# Altium schematic symbol library Crystal_Osilator.SchLib: 109 symbols (part 1 of 2)
Pins are listed as number, name and electrical type; pins without a type are passive.

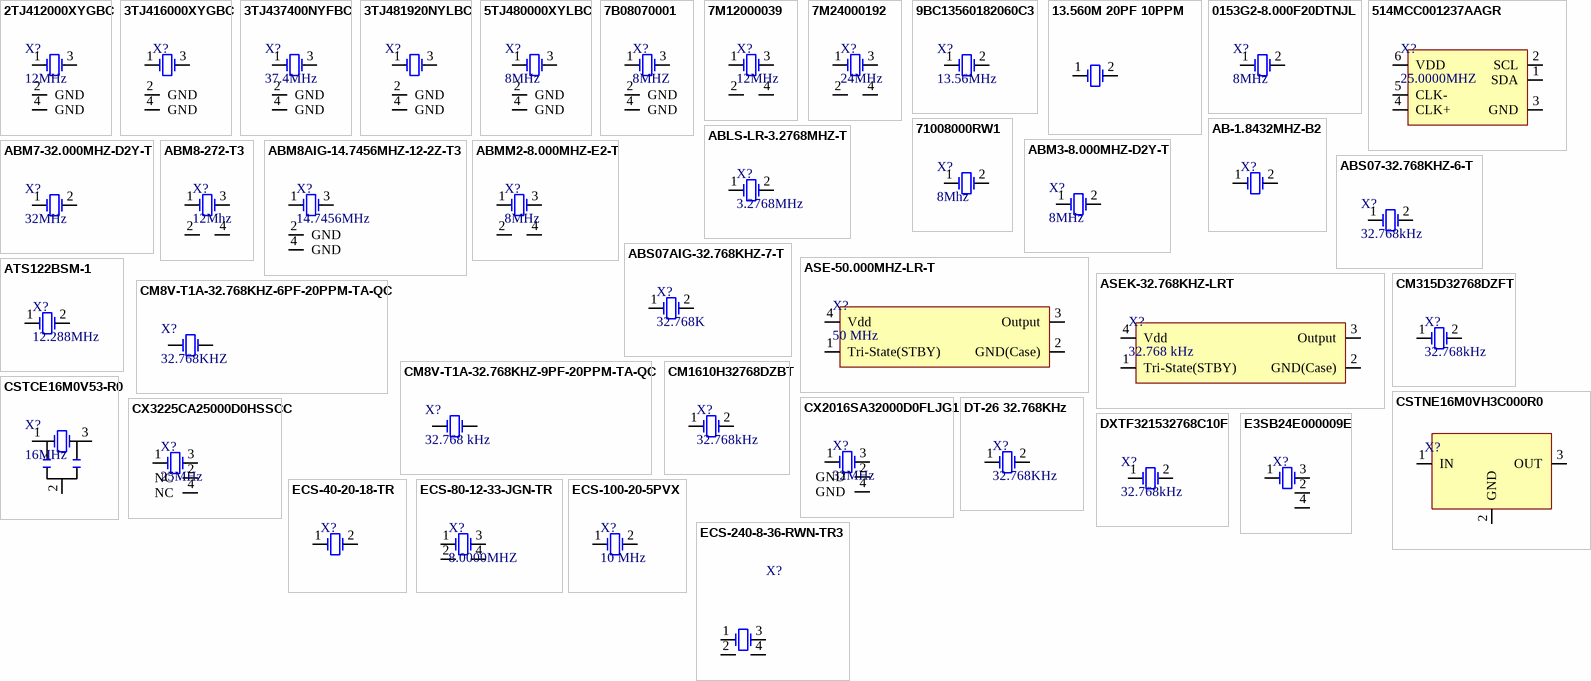
[diagram p0: symbols 2TJ412000XYGBC to ECS-240-8-36-RWN-TR3]

## 2TJ412000XYGBC
designator X?, comment 12MHz
12MHz 18pF ±10ppm SMD2520-4P Crystals ROHS; Manufacturer: JYJE; Manufacturer Part Number: 2TJ412000XYGBC; Package: SMD2520-4P; LCSC Part Number: C2149207; Item Type: Crystal; ComponentLink1Description: LCSC; ComponentLink1URL: https://www.lcsc.com/product-detail/Crystals_JYJE-2TJ412000XYGBC_C2149207.html
footprint SMD2520-4P
pins: 1 OSC1, 2 GND, 3 OSC2, 4 GND

## 3TJ416000XYGBC
designator X?
16MHz 贴片晶振 18pF ±10ppm ±30ppm SMD3225-4P Crystals ROHS; Manufacturer: JYJE; Manufacturer Part Number: 3TJ416000XYGBC; Supplier: LCSC; LCSC Part Number: C2149027; RoHS: No; Item Type: Crystal
footprint SMD3225-4P
pins: 1 OSC1, 2 GND, 3 OSC2, 4 GND

## 3TJ437400NYFBC
designator X?, comment 37.4MHz
37.4MHz SMD Crystal Resonator 12pF 60Ω SMD3225-4P Crystals ROHS; Manufacturer: JYJE; Manufacturer Part Number: 3TJ437400NYFBC; Value: 37.4MHz; Footprint: Custom; ComponentLink1Description: LCSC; ComponentLink1URL: https://lcsc.com/product-detail/Crystals_JYJE-3TJ437400NYFBC_C2149138.html; LCSC Part Number: C2149138; Item Type: Crystal
footprint 3TJ437400NYFBC_
pins: 1 OSC1, 2 GND, 3 OSC2, 4 GND

## 3TJ481920NYLBC
designator X?
8.192MHz SMD Crystal Resonator 12pF 150Ω SMD_3225_4P Crystals ROHS; Manufacturer: JYJE; Manufacturer Part Number: 3TJ481920NYLBC; Footprint: Custom; ComponentLink1Description: LCSC; ComponentLink1URL: https://lcsc.com/product-detail/Crystals_JYJE-3TJ481920NYLBC_C2898996.html; Value: 8.192MHz; LCSC Part Number: C2898996; Item Type: Crystal
footprint 3TJ481920NYLBC_
pins: 1 OSC1, 2 GND, 3 OSC2, 4 GND

## 5TJ480000XYLBC
designator X?, comment 8MHz
8MHz 18pF ±10ppm SMD5032-4P Crystals ROHS; Manufacturer: JYJE; Manufacturer Part Number: 5TJ480000XYLBC; ComponentLink1Description: LCSC; ComponentLink1URL: https://www.lcsc.com/product-detail/Crystals_JYJE-5TJ480000XYLBC_C2149247.html; Package: SMD5032-4P; LCSC Part Number: C2149247; Item Type: Crystal
footprint 5TJ480000XYLBC_
pins: 1 OSC1, 2 GND, 3 OSC2, 4 GND

## 7B08070001
designator X?, comment 8MHZ
CRYSTAL 8.0000MHZ 18PF SMD; Manufacturer: TXC; Manufacturer Part Number: 7B08070001; Frequency Stability: 20ppm; Supplier 1: Digi-Key; Stock 1: 0; Pricing 1: 1000=0.39 (USD); Mount: Surface Mount; Case/Package: SMD/SMT; Min Operating Temperature: -20°C; Max Operating Temperature: 75°C; Frequency: 8MHz; Load Capacitance: 18pF; Frequency Tolerance: 20ppm; Length: 0.197inch; Height: 0.041inch; Width: 0.126inch; ComponentLink1URL: http://www.txccorp.com/download/products/quartz_crystals/2015TXC_7B_19.pdf?src-supplier=Digi-Key; ComponentLink1Description: http://www.txccorp.com/download/products/quartz_crystals/2015TXC_7B_19.pdf?src-supplier=Digi-Key; ComponentLink2URL: http://www.mouser.com/ds/2/417/7b-5226.pdf?src-supplier=Mouser; ComponentLink2Description: http://www.mouser.com/ds/2/417/7b-5226.pdf?src-supplier=Mouser; Supplier Part Number 1: 7B08070001-ND; LCSC Part Number: C331620; Item Type: Crystal
footprint 7B08070001_
pins: 1 OSC1, 2 GND, 3 OSC2, 4 GND

## 7M12000039
designator X?, comment 12MHz
12MHz Surface Mount Crystal 18pF ±20ppm ±20ppm SMD3225-4P Crystals ROHS; Manufacturer: TXC Corp; Manufacturer Part Number: 7M12000039; Item Type: Crytal; Package: SMD3225-4P; LCSC Part Number: C90900; ComponentLink1Description: LCSC; ComponentLink1URL: https://www.lcsc.com/product-detail/Crystals_TXC-Corp-7M12000039_C90900.html
footprint SMD3225-4P
pins: 1 OSC1, 2 GND, 3 OSC2, 4 GND

## 7M24000192
designator X?, comment 24MHz
24MHz Surface Mount Crystal 12pF ±10ppm ±10ppm SMD3225-4P Crystals ROHS; Manufacturer: TXC Corp; Manufacturer Part Number: 7M24000192; Item Type: Crytal; Package: SMD3225-4P; LCSC Part Number: C331579; ComponentLink1Description: LCSC; ComponentLink1URL: https://www.lcsc.com/product-detail/Crystals_TXC-Corp-7M24000192_C331579.html
footprint SMD3225-4P
pins: 1 OSC1, 2 GND, 3 OSC2, 4 GND

## 9BC13560182060C3
designator X?, comment 13.56MHz
13.56MHz 49S Crystals 18pF 60Ω HC-49S-2P Crystals ROHS; Manufacturer: JGHC; Manufacturer Part Number: 9BC13560182060C3; Package: HC-49S-2P; LCSC Part Number: C2715873; ComponentLink1Description: LCSC; ComponentLink1URL: https://www.lcsc.com/product-detail/Crystals_JGHC-9BC13560182060C3_C2715873.html; Item Type: Crystal
footprint HC-49S-2P
pins: 1 OSC1, 2 OSC2

## 13.560M 20PF 10PPM
designator X?, comment 13.56MHz
13.56MHz null ±10ppm HC-49S-SMD-2P-Mini Crystals ROHS; Manufacturer: SST; Manufacturer Part Number: 13.560M 20PF 10PPM; Package: HC-49S-SMD-2P-Mini; LCSC Part Number: C2975362; Item Type: Crystal; ComponentLink1Description: LCSC
footprint HC-49S-SMD-2P-Mini
pins: 1 OSC1, 2 OSC2

## 0153G2-8.000F20DTNJL
designator X?, comment 8MHz
8MHz Surface Mount Crystal 20pF ±10ppm ±30ppm SMD5032 Crystals ROHS; Manufacturer: HCI; Manufacturer Part Number: 0153G2-8.000F20DTNJL; Package: SMD5032; LCSC Part Number: C19270155; Item Type: Crystal; ComponentLink1Description: LCSC; ComponentLink1URL: https://www.lcsc.com/product-detail/Crystals_HCI-0153G2-8-000F20DTNJL_C19270155.html
footprint 0153G2-8.000F20DTNJL
pins: 1 OSC1, 2 OSC2

## 514MCC001237AAGR
designator X?, comment 25.0000MHZ
XTAL OSC XO 25.0000MHZ CMOS DUAL; Manufacturer: Skyworks Solutions; Manufacturer Part Number: 514MCC001237AAGR; Description: Programmable Oscillators Differential/single-ended; I2C programmable XO; 0.1-250 MHz; Item Type: Crystals; Fall Time: 1.2ns; Frequency Stability: 20ppm; Load Capacitance: 15pF; Low Level Output Current: 8mA; Clock Frequency: 212.5MHz; Max Supply Current: 26mA; Max Supply Voltage: 3.63V; Min Supply Voltage: 2.97V; Operating Supply Voltage: 3.3V; Supplier: DigiKey; Supplier Part Number: 514MCC001237AAGR-ND; RoHS: Compliant; Pricing: 1000=12.9625 (USD); China RoHS: Compliant; Lifecycle Status: Production; Max Operating Temperature: 85°C; Min Operating Temperature: -40°C; Mounting Technology: Surface Mount; Number of Terminals: 6; REACH SVHC: Yes; Rise Time: 1.2ns; ComponentLink1URL: https://datasheet.octopart.com:443/514MCC001237AAGR-Skyworks-Solutions-datasheet-180774471.pdf?src-supplier=IHS; ComponentLink1Description: https://datasheet.octopart.com:443/514MCC001237AAGR-Skyworks-Solutions-datasheet-180774471.pdf?src-supplier=IHS
pins: 1 SDA, 2 SCL, 3 GND, 4 CLK+, 5 CLK-, 6 VDD

## 71008000RW1
designator X?, comment 8Mhz
8MHz 20pF ±20ppm HC-49S Crystals ROHS; Manufacture Part Number: 71008000RW1; Manufacture: HD; LCSC Part Number: C655216; Package: HC-49S; Item Type: Crystal; ComponentLink1Description: LCSC; ComponentLink1URL: https://www.lcsc.com/product-detail/Crystals_HD-71008000RW1_C655216.html
footprint 71008000RW1
pins: 1 OSC1, 2 OSC2

## AB-1.8432MHZ-B2
designator X?
CRYSTAL 1.8432MHZ 18PF TH; Manufacturer: Abracon; Manufacturer Part Number: AB-1.8432MHZ-B2; Item Type: Crystals; ESR (Equivalent Series Resistance): 750R; Frequency Stability: 100ppm; Frequency Tolerance: 0.002%; Supplier: Mouser; LCSC Part Number: C568361; RoHS: No; Stock: 1186; Pricing: 1=0.93, 10=0.722, 50=0.722, 100=0.685, 1000=0.537, 10000=0.487 (USD); Mounting Technology: 9Mount; Pins: 2NUMBER; Min Operating Temperature: -20°C; Max Operating Temperature: 70°C; Frequency: 1.8432MHz; Load Capacitance: 18pF; Packaging: 14Packaging; Length: 11.5mm; Width: 5mm; Height: 13.46mm; Lead Free: 5697LeadFree; ComponentLink1URL: https://abracon.com/Resonators/ab.pdf?src-supplier=Digikey; ComponentLink1Description: https://abracon.com/Resonators/ab.pdf?src-supplier=Digikey; ComponentLink2URL: https://datasheet.octopart.com/AB-1.8432MHZ-B2-Abracon-datasheet-12494869.pdf?src-supplier=Sager+Electronics; ComponentLink2Description: https://datasheet.octopart.com/AB-1.8432MHZ-B2-Abracon-datasheet-12494869.pdf?src-supplier=Sager+Electronics; ComponentLink3URL: https://datasheet.octopart.com/AB-1.8432MHZ-B2-Abracon-datasheet-139816265.pdf?src-supplier=Master+Electronics; ComponentLink3Description: https://datasheet.octopart.com/AB-1.8432MHZ-B2-Abracon-datasheet-139816265.pdf?src-supplier=Master+Electronics
footprint HC-49U
pins: 1 OSC1, 2 OSC2

## ABLS-LR-3.2768MHZ-T
designator X?, comment 3.2768MHz
CRYSTAL 3.2768MHZ 18PF SMD; Manufacturer: Abracon; Manufacturer Part Number: ABLS-LR-3.2768MHZ-T; Item Type: Crystals; Supplier: Mouser; Supplier Part Number: 815-ABLS-LR-3.27M-T; RoHS: Yes; Stock: 427; Pricing: 1=2.39, 10=2.12, 50=2.1, 100=2.09, 1000=2.04, 10000=2.02 (USD); ComponentLink1URL: https://datasheet.ciiva.com/856/abls-lr-856736.pdf?src-supplier=Digikey; ComponentLink1Description: https://datasheet.ciiva.com/856/abls-lr-856736.pdf?src-supplier=Digikey; ComponentLink2URL: https://datasheet.ciiva.com/16423/abls-lr-16423580.pdf?src-supplier=Future+Electronics; ComponentLink2Description: https://datasheet.ciiva.com/16423/abls-lr-16423580.pdf?src-supplier=Future+Electronics; ComponentLink3URL: https://datasheet.ciiva.com/856/abls-lr-856735.pdf?src-supplier=Digikey; ComponentLink3Description: https://datasheet.ciiva.com/856/abls-lr-856735.pdf?src-supplier=Digikey; ComponentLink4URL: https://datasheet.ciiva.com/856/abls-lr-856737.pdf?src-supplier=Digikey; ComponentLink4Description: https://datasheet.ciiva.com/856/abls-lr-856737.pdf?src-supplier=Digikey; ComponentLink5URL: https://datasheet.ciiva.com/3175/abls-lr-3175479.pdf?src-supplier=Avnet; ComponentLink5Description: https://datasheet.ciiva.com/3175/abls-lr-3175479.pdf?src-supplier=Avnet
footprint HC-49S-SMD
pins: 1 OSC1, 2 OSC2

## ABM3-8.000MHZ-D2Y-T
designator X?, comment 8MHz
5032 2-SMD 8MHz 18pF ±20ppm -40°C~85°C; Manufacturer: Abracon; Manufacturer Part Number: ABM3-8.000MHZ-D2Y-T; ESR (Equivalent Series Resistance): 140R; Frequency Stability: 30ppm; ESR: 500R; Item Type: Crystal; Supplier 1: Future Electronics; RoHS: Yes; Category: Crystals; Stock 1: 294000; Pricing 1: 1000=0.36500, 2000=0.35500, 3000=0.35000, 4000=0.34500, 5000=0.33500 (USD); Mounting Technology: Surface Mount; Case/Package: SMD/SMT; Pins: 2; Min Operating Temperature: -40°C; Max Operating Temperature: 85°C; Frequency: 8MHz; Tolerance: 20ppm; Load Capacitance: 18pF; Packaging: Cut Tape; Package Quantity: 1000; Frequency Tolerance: 20ppm; Termination: SMD/SMT; Resistor Type: Ceramic; Series: ABM3; Length: 5mm; Width: 3.2mm; Height: 0.051inch; Depth: 3.2mm; Radiation Hardening: No; Lead Free: Lead Free; RoHS Compliant: Yes; ComponentLink1URL: https://datasheet.ciiva.com/862/abm3-862465.pdf?src-supplier=Digi-Key; ComponentLink1Description: https://datasheet.ciiva.com/862/abm3-862465.pdf?src-supplier=Digi-Key; Supplier Part Number 1: 9005104; LCSC Part Number: C144380
footprint SMD5032-2P
pins: 1 OSC1, 2 OSC2

## ABM7-32.000MHZ-D2Y-T
designator X?, comment 32MHz
CRYSTAL 32.0000MHZ 18PF SMD; Manufacturer: Abracon; Manufacturer Part Number: ABM7-32.000MHZ-D2Y-T; ESR (Equivalent Series Resistance): 50R; Tolerance: 20ppm; Frequency Stability: 30ppm; Supplier 1: Mouser; RoHS: Yes; Category: Crystals; Stock 1: 966; Pricing 1: 1=0.87000, 10=0.77300, 50=0.77300, 100=0.63900, 1000=0.50300, 10000=0.50300 (USD); Mounting Technology: Surface Mount; Case/Package: CSMD; Pins: 2; Min Operating Temperature: -40°C; Max Operating Temperature: 85°C; Frequency: 32MHz; Load Capacitance: 18pF; Package Quantity: 1; Packaging: Tape and Reel; Frequency Tolerance: 20ppm; Termination: SMD/SMT; Resistor Type: Ceramic; ESR: 50R; Series: ABM7; Operating Frequency: 32 MHz; Length: 6mm; Width: 0.138inch; Height: 0.055inch; Depth: 3.5mm; Radiation Hardening: No; Lead Free: Lead Free; ComponentLink1URL: https://datasheet.ciiva.com/18649/abm7-18649657.pdf?src-supplier=Digi-Key; ComponentLink1Description: https://datasheet.ciiva.com/18649/abm7-18649657.pdf?src-supplier=Digi-Key; ComponentLink2URL: https://datasheet.ciiva.com/18649/abm7-18649658.pdf?src-supplier=Digi-Key; ComponentLink2Description: https://datasheet.ciiva.com/18649/abm7-18649658.pdf?src-supplier=Digi-Key; ComponentLink3URL: https://datasheet.ciiva.com/18649/abm7-18649659.pdf?src-supplier=Digi-Key; ComponentLink3Description: https://datasheet.ciiva.com/18649/abm7-18649659.pdf?src-supplier=Digi-Key; ComponentLink4URL: https://datasheet.ciiva.com/3175/abm7-3175950.pdf?src-supplier=Avnet; ComponentLink4Description: https://datasheet.ciiva.com/3175/abm7-3175950.pdf?src-supplier=Avnet; ComponentLink5URL: https://datasheet.ciiva.com/28624/947971-28624821.pdf?src-supplier=Element14; ComponentLink5Description: https://datasheet.ciiva.com/28624/947971-28624821.pdf?src-supplier=Element14; ComponentLink6URL: https://datasheet.ciiva.com/16416/abm7-16416937.pdf?src-supplier=Future+Electronics; ComponentLink6Description: https://datasheet.ciiva.com/16416/abm7-16416937.pdf?src-supplier=Future+Electronics; ComponentLink7URL: https://datasheet.ciiva.com/3175/abm7-3175949.pdf?src-supplier=Avnet; ComponentLink7Description: https://datasheet.ciiva.com/3175/abm7-3175949.pdf?src-supplier=Avnet; Supplier Part Number 1: 815-ABM7-32-D2Y-T; LCSC Part Number: C1986810; Item Type: Crystal
footprint SMD6035-2P
pins: 1 OSC1, 2 OSC2

## ABM8-272-T3
designator X?, comment 12Mhz
CRYSTAL 12.0000MHZ 10PF SMD; Manufacturer: Abracon; Manufacturer Part Number: ABM8-272-T3; Item Type: Crytal; Supplier: Mouser; LCSC Part Number: C20625731; RoHS: No; Stock: 14884; Pricing: 1=0.58, 10=0.452, 50=0.452, 100=0.421, 1000=0.358, 10000=0.296 (USD)
footprint SMD3225-4P
pins: 1 OSC1, 2 GND, 3 OSC2, 4 GND

## ABM8AIG-14.7456MHZ-12-2Z-T3
designator X?, comment 14.7456MHz
CRYSTAL 14.7456MHZ 12PF SMD; Manufacturer: Abracon; Manufacturer Part Number: ABM8AIG-14.7456MHZ-12-2Z-T3; Item Type: Crystals; Supplier: Mouser; LCSC Part Number: C5544758; RoHS: Yes; Stock: 3296; Pricing: 1=0.74, 10=0.67, 50=0.67, 100=0.67, 1000=0.67, 10000=0.67 (USD); ComponentLink1URL: http://www.mouser.com/ds/2/3/ABM8AIG-783590.pdf?src-supplier=Mouser; ComponentLink1Description: http://www.mouser.com/ds/2/3/ABM8AIG-783590.pdf?src-supplier=Mouser; ComponentLink2URL: https://abracon.com/AIGcrystals/ABM8AIG.pdf?src-supplier=Digikey; ComponentLink2Description: https://abracon.com/AIGcrystals/ABM8AIG.pdf?src-supplier=Digikey
footprint SMD3225-4P
pins: 1 OSC1, 2 GND, 3 OSC2, 4 GND

## ABMM2-8.000MHZ-E2-T
designator X?, comment 8MHz
CRYSTAL 8.0000MHZ 18PF SMD; Manufacturer: Abracon; Manufacturer Part Number: ABMM2-8.000MHZ-E2-T; Item Type: Crystals; Supplier: Mouser; LCSC Part Number: C431529; RoHS: Yes; Stock: 10241; Pricing: 1=0.84, 10=0.724, 50=0.724, 100=0.676, 1000=0.493, 10000=0.437 (USD); Lead Free: 5697LeadFree; ComponentLink1URL: https://datasheet.ciiva.com/4945/abmm2-40161-4945441.pdf?src-supplier=Mouser; ComponentLink1Description: https://datasheet.ciiva.com/4945/abmm2-40161-4945441.pdf?src-supplier=Mouser; ComponentLink2URL: https://datasheet.ciiva.com/7998/1682206-7998656.pdf?src-supplier=Element14; ComponentLink2Description: https://datasheet.ciiva.com/7998/1682206-7998656.pdf?src-supplier=Element14; ComponentLink3URL: https://datasheet.ciiva.com/855/abmm2-855405.pdf?src-supplier=Digikey; ComponentLink3Description: https://datasheet.ciiva.com/855/abmm2-855405.pdf?src-supplier=Digikey; ComponentLink4URL: https://datasheet.ciiva.com/855/abmm2-855406.pdf?src-supplier=Digikey; ComponentLink4Description: https://datasheet.ciiva.com/855/abmm2-855406.pdf?src-supplier=Digikey; ComponentLink5URL: https://datasheet.ciiva.com/855/abmm2-855407.pdf?src-supplier=Digikey; ComponentLink5Description: https://datasheet.ciiva.com/855/abmm2-855407.pdf?src-supplier=Digikey; ComponentLink6URL: https://datasheet.ciiva.com/3176/abmm2-3176155.pdf?src-supplier=Avnet; ComponentLink6Description: https://datasheet.ciiva.com/3176/abmm2-3176155.pdf?src-supplier=Avnet
footprint SMD6035-4P
pins: 1 OSC1, 2 GND, 3 OSC2, 4 GND

## ABS07-32.768KHZ-6-T
designator X?, comment 32.768kHz
CRYSTAL 32.7680KHZ 6PF SMD; Manufacturer: Abracon; Manufacturer Part Number: ABS07-32.768KHZ-6-T; Item Type: Crystals; Tolerance: 20ppm; ESR (Equivalent Series Resistance): 70kR; Supplier: Mouser; LCSC Part Number: C1985518; RoHS: Yes; Stock: 26780; Pricing: 1=0.69, 10=0.557, 50=0.557, 100=0.536, 1000=0.459, 10000=0.396 (USD); Mounting Technology: Surface Mount; Case/Package: CSMD; Pins: 2; Min Operating Temperature: -40°C; Max Operating Temperature: 85°C; Frequency: 32.768kHz; Load Capacitance: 6pF; Packaging: Tape and Reel; Frequency Tolerance: 20ppm; Package Quantity: 3000; Termination: SMD/SMT; ESR: 70kR; Series: ABS07; Operating Frequency: 32.768 kHz; Length: 3.2mm; Width: 1.5mm; Height: 0.9mm; Depth: 1.5mm; Radiation Hardening: No; Reach SVHC Compliant: No; Lead Free: Lead Free; RoHS Compliant: Yes
footprint SMD3215-2P
pins: 1 OSC1, 2 OSC2

## ABS07AIG-32.768KHZ-7-T
designator X?, comment 32.768K
CRYSTAL 32.7680KHZ 7PF SMD; Manufacturer: Abracon; Manufacturer Part Number: ABS07AIG-32.768KHZ-7-T; Item Type: Crystals; Supplier: Mouser; LCSC Part Number: C6277873; RoHS: Yes; Stock: 5721; Pricing: 1=0.53, 10=0.386, 50=0.386, 100=0.386, 1000=0.379, 10000=0.317 (USD); ComponentLink1URL: http://www.mouser.com/ds/2/3/ABS07AIG-783567.pdf?src-supplier=Mouser; ComponentLink1Description: http://www.mouser.com/ds/2/3/ABS07AIG-783567.pdf?src-supplier=Mouser; ComponentLink2URL: https://abracon.com/Support/flyer/AutoGrade-AIG-Crystals.pdf?src-supplier=Digikey; ComponentLink2Description: https://abracon.com/Support/flyer/AutoGrade-AIG-Crystals.pdf?src-supplier=Digikey
footprint SMD3215-2P
pins: 1 OSC1, 2 OSC2

## ASE-50.000MHZ-LR-T
designator X?, comment 50 MHz
Oscillator XO 50MHz ±25ppm 15pF CMOS 55% 3.3V 4-Pin SMD T/R; Manufacturer: Abracon; Manufacturer Part Number: ASE-50.000MHZ-LR-T; Item Type: Oscillators; Max Supply Voltage: 3.465V; Min Supply Voltage: 3.135V; Max Supply Current: 19mA; Supplier: Mouser; Supplier Part Number: 815-ASE50.000MHZLRT; RoHS: Yes; Stock: 4784; Pricing: 1=1.25, 10=1.2, 50=1.2, 100=1, 1000=0.712, 10000=0.628 (USD); Mounting Technology: Surface Mount; Case/Package: SMD/SMT; Pins: 4; Min Operating Temperature: -40°C; Max Operating Temperature: 85°C; Packaging: Cut Tape; Frequency: 50MHz; Operating Supply Voltage: 3.3V; Load Capacitance: 15pF; Package Quantity: 1000; Frequency Stability: 25ppm; Series: ASE; Length: 0.126inch; Width: 0.098inch; Height: 0.039inch; Reach SVHC Compliant: Unknown; ComponentLink1URL: https://datasheet.ciiva.com/8058/aseseries-8058620.pdf?src-supplier=Element14; ComponentLink1Description: https://datasheet.ciiva.com/8058/aseseries-8058620.pdf?src-supplier=Element14; ComponentLink2URL: https://datasheet.ciiva.com/1358/aseseries-1358196.pdf?src-supplier=Element14; ComponentLink2Description: https://datasheet.ciiva.com/1358/aseseries-1358196.pdf?src-supplier=Element14; ComponentLink3URL: https://datasheet.ciiva.com/872/aseseries-872952.pdf?src-supplier=Digikey; ComponentLink3Description: https://datasheet.ciiva.com/872/aseseries-872952.pdf?src-supplier=Digikey
footprint SMD3225-4P
pins: 1 Tri-State(STBY), 2 GND(Case), 3 Output, 4 Vdd

## ASEK-32.768KHZ-LRT
designator X?, comment 32.768 kHz
XTAL OSC XO 32.7680KHZ CMOS SMD; Manufacturer: Abracon; Manufacturer Part Number: ASEK-32.768KHZ-LRT; Item Type: Oscillators; Operating Supply Voltage: 3.3V; Frequency Stability: 25ppm; Load Capacitance: 15pF; Max Supply Voltage: 3.63V; Min Supply Voltage: 2.97V; Max Supply Current: 3.5mA; Frequency Tolerance: 0.0025%; Supplier: Mouser; LCSC Part Number: C2650753; RoHS: Yes; Stock: 11027; Pricing: 1=1.51, 10=1.19, 50=1.19, 100=1.14, 1000=0.989, 10000=0.709 (USD); Mounting Technology: Surface Mount; Case/Package: SMD/SMT; Pins: 4; Min Operating Temperature: -40°C; Max Operating Temperature: 85°C; Packaging: Tape and Reel; Termination: SMD/SMT; Series: ASEK; Operating Frequency: 32.768 kHz; Frequency: 32.768kHz; Length: 3.2mm; Depth: 2.5mm; Radiation Hardening: No; Lead Free: Lead Free; Reach SVHC Compliant: No; ComponentLink1URL: http://www.farnell.com/datasheets/700361.pdf?src-supplier=Farnell; ComponentLink1Description: http://www.farnell.com/datasheets/700361.pdf?src-supplier=Farnell; ComponentLink2URL: http://www.farnell.com/datasheets/700361.pdf?src-supplier=Element14; ComponentLink2Description: http://www.farnell.com/datasheets/700361.pdf?src-supplier=Element14; ComponentLink3URL: http://www.farnell.com/datasheets/700361.pdf?src-supplier=Newark; ComponentLink3Description: http://www.farnell.com/datasheets/700361.pdf?src-supplier=Newark
footprint SMD3225-4P
pins: 1 Tri-State(STBY), 2 GND(Case), 3 Output, 4 Vdd

## ATS122BSM-1
designator X?, comment 12.288MHz
12.288MHz 18pF ±30ppm ±50ppm HC-49S-SMD Crystals ROHS; Manufacturer: CTS; Manufacturer Part Number: ATS122BSM-1; ESR (Equivalent Series Resistance): 40R; Supplier: Digikey; Supplier Part Number: CTX889TR-ND; RoHS: Yes; Item Type: Crystals; Pricing: 1000=0.19715 (USD); Mounting Technology: Surface Mount; Pins: 2; Contact Plating: Copper,Tin,Silver; Min Operating Temperature: -20°C; Max Operating Temperature: 70°C; Package Quantity: 1000; Frequency: 12.288MHz; Frequency Tolerance: 30ppm; Load Capacitance: 18pF; Packaging: Tape and Reel; Tolerance: 30ppm; Frequency Stability: 50ppm; Termination: SMD/SMT; Series: ATS-SM; Length: 12.3mm; Width: 4.83mm; Height: 4.3mm; RoHS Compliant: Yes; ComponentLink1URL: https://datasheet.ciiva.com/857/008-0309-0-857074.pdf?src-supplier=Digikey; ComponentLink1Description: https://datasheet.ciiva.com/857/008-0309-0-857074.pdf?src-supplier=Digikey; ComponentLink2URL: https://datasheet.ciiva.com/857/008-0309-0-857076.pdf?src-supplier=Digikey; ComponentLink2Description: https://datasheet.ciiva.com/857/008-0309-0-857076.pdf?src-supplier=Digikey; ComponentLink3URL: https://datasheet.ciiva.com/857/008-0309-0-857075.pdf?src-supplier=Digikey; ComponentLink3Description: https://datasheet.ciiva.com/857/008-0309-0-857075.pdf?src-supplier=Digikey; ComponentLink4URL: https://datasheet.ciiva.com/3176/008-0309-0-3176412.pdf?src-supplier=Avnet; ComponentLink4Description: https://datasheet.ciiva.com/3176/008-0309-0-3176412.pdf?src-supplier=Avnet; LCSC Part Number: C2961918
footprint HC-49S-SMD
pins: 1 OSC1, 2 OSC2

## CM8V-T1A-32.768KHZ-6PF-20PPM-TA-QC
designator X?, comment 32.768KHZ
Crystal 32.768KHZ 6.0PF SMD; Manufacturer: Micro Crystal; Manufacturer Part Number: CM8V-T1A-32.768KHZ-6PF-20PPM-TA-QC; Supplier 1: Digi-Key; RoHS: No; Stock 1: 21000; Pricing 1: 1=0.68000, 10=0.56400, 50=0.50740, 100=0.45100, 500=0.42844 (USD); Supplier Part Number 1: 2195-CM8V-T1A-32.768KHZ-6PF-20PPM-TA-QCCT-ND
footprint 2-SMD, (2.00mm x 1.20mm)
pins: 1 OSC1, 2 OSC2

## CM8V-T1A-32.768KHZ-9PF-20PPM-TA-QC
designator X?, comment 32.768 kHz
CRYSTAL 32.7680KHZ 9PF SMD; Manufacturer: Micro Crystal; Manufacturer Part Number: CM8V-T1A-32.768KHZ-9PF-20PPM-TA-QC; Supplier: Digikey; Supplier Part Number: 2195-CM8V-T1A-32.768KHZ-9PF-20PPM-TA-QCCT-ND; RoHS: No; Item Type: Crystal; Stock: 65707; Pricing: 1=0.58, 10=0.499, 50=0.4496, 100=0.43, 500=0.3878 (USD)
footprint 2-SMD, (2.00mm x 1.20mm)
pins: 1 OSC1, 2 OSC2

## CM315D32768DZFT
designator X?, comment 32.768kHz
CRYSTAL 32.7680KHZ 12.5PF SMD; Manufacturer: Citizen; Manufacturer Part Number: CM315D32768DZFT; Item Type: Crystals; Supplier: Digikey; LCSC Part Number: C182057; RoHS: Yes; Stock: 343217; Pricing: 1=0.5, 10=0.432, 50=0.3892, 100=0.3723, 500=0.3358, 1000=0.32128 (USD); Lead Free: 5697LeadFree; ComponentLink1URL: https://datasheet.ciiva.com/16437/cm315-16437047.pdf?src-supplier=Future+Electronics; ComponentLink1Description: https://datasheet.ciiva.com/16437/cm315-16437047.pdf?src-supplier=Future+Electronics
footprint SMD3215-2P
pins: 1 OSC1, 2 OSC2

## CM1610H32768DZBT
designator X?, comment 32.768kHz
CRYSTAL 32.7680KHZ 6PF SMD; Manufacturer: CITIZEN; Manufacturer Part Number: CM1610H32768DZBT; Item Type: Crystals; Package: SMD1610-2P; LCSC Part Number: C1985673; ComponentLink1Description: LCSC; ComponentLink1URL: https://www.lcsc.com/product-detail/Crystals_CITIZEN-CM1610H32768DZBT_C1985673.html
footprint SMD1610-2P
pins: 1 OSC1, 2 OSC2

## CSTCE16M0V53-R0
designator X?, comment 16MHz
16MHz 15pF ±0.5%; Manufacturer: Murata; Manufacturer Part Number: CSTCE16M0V53-R0; Impedance: 40R; Frequency Stability: 0.3%; Item Type: Cystal; Supplier 1: Farnell; RoHS: Yes; Category: Capacitors; Pricing 1: 5=0.34500, 50=0.26100, 250=0.23600, 500=0.19400, 1500=0.18300, 3000=0.17100, 15000=0.16800 (GBP); Case/Package: SMD/SMT; Number of Pins: 3; Contact Plating: Gold; Weight: 0.001023oz; Min Operating Temperature: -20°C; Max Operating Temperature: 80°C; Frequency: 16MHz; Frequency Tolerance: 0.5%; Self Resonant Frequency: 16MHz; Load Capacitance: 15pF; Tolerance: 0.5%; Package Quantity: 3000; Capacitance: 15pF; Packaging: Tape and Reel; Termination: SMD/SMT; Resistor Type: Ceramic; Series: CERALOCK® CSTCE; Length: 3.2mm; Width: 1.3mm; Height: 0.9mm; Reach SVHC Compliant: Yes; Lead Free: Lead Free; RoHS Compliant: Yes; ComponentLink1URL: https://datasheet.ciiva.com/18183/getdatasheetpartid-152969-18183272.pdf?src-supplier=Verical; ComponentLink1Description: https://datasheet.ciiva.com/18183/getdatasheetpartid-152969-18183272.pdf?src-supplier=Verical; ComponentLink2URL: https://datasheet.ciiva.com/1361/1506176-1361293.pdf?src-supplier=Element14; ComponentLink2Description: https://datasheet.ciiva.com/1361/1506176-1361293.pdf?src-supplier=Element14; ComponentLink3URL: https://datasheet.ciiva.com/14132/ceralock-eng-bro-14132735.pdf?src-supplier=Distrelec; ComponentLink3Description: https://datasheet.ciiva.com/14132/ceralock-eng-bro-14132735.pdf?src-supplier=Distrelec; ComponentLink4URL: https://datasheet.ciiva.com/884/p16e-884478.pdf?src-supplier=Digi-Key; ComponentLink4Description: https://datasheet.ciiva.com/884/p16e-884478.pdf?src-supplier=Digi-Key; ComponentLink5URL: https://datasheet.ciiva.com/884/p16e-884477.pdf?src-supplier=Digi-Key; ComponentLink5Description: https://datasheet.ciiva.com/884/p16e-884477.pdf?src-supplier=Digi-Key; ComponentLink6URL: https://datasheet.ciiva.com/884/p16e-884479.pdf?src-supplier=Digi-Key; ComponentLink6Description: https://datasheet.ciiva.com/884/p16e-884479.pdf?src-supplier=Digi-Key; ComponentLink7URL: https://datasheet.ciiva.com/16216/l0430e-16216847.pdf?src-supplier=Future+Electronics; ComponentLink7Description: https://datasheet.ciiva.com/16216/l0430e-16216847.pdf?src-supplier=Future+Electronics; Supplier Part Number 1: 2443265; LCSC Part Number: C32180
footprint SMD3213-3P
pins: 1 CRYSTAL, 2, 3 CRYSTAL

## CSTNE16M0VH3C000R0
designator X?
CERAMIC RES 16.0000MHZ 15PF SMD; Manufacturer: Murata; Manufacturer Part Number: CSTNE16M0VH3C000R0; Item Type: Crystal; Frequency: 16MHz; Frequency Stability: 0.13%; Frequency Tolerance: 0.07%; Impedance: 40R; Supplier: Future Electronics; Supplier Part Number: 4126216; RoHS: Yes; Stock: 3000; Pricing: 3000=0.168, 6000=0.164, 9000=0.162, 12000=0.161, 15000=0.157 (USD); Mounting Technology: Surface Mount; Case/Package: SMD/SMT; Min Operating Temperature: -40°C; Max Operating Temperature: 125°C; Packaging: Cut Tape; Value: 15pF; Series: CERALOCK® CSTNE; RoHS Compliant: Yes; ComponentLink1URL: https://www.murata.com/en/products/productdata/8801162264606/SPEC-CSTNE16M0VH3C000R0.pdf?src-supplier=Digikey; ComponentLink1Description: https://www.murata.com/en/products/productdata/8801162264606/SPEC-CSTNE16M0VH3C000R0.pdf?src-supplier=Digikey; LCSC Part Number: C882605
footprint SMD3213-3P
pins: 1 IN, 2 GND, 3 OUT

## CX2016SA32000D0FLJG1
designator X?, comment 32MHz
2.05X1.65X0.45MM SIZE, 32MHZ, +/; Manufacturer: AVX; Manufacturer Part Number: CX2016SA32000D0FLJG1; Item Type: Crystals; Supplier: Digikey; LCSC Part Number: C7257527; RoHS: No; Stock: 1276; Pricing: 1=0.57, 10=0.488, 50=0.4402, 100=0.4209, 500=0.37964, 1000=0.36319 (USD)
footprint SMD2016-4P
pins: 1 HOT, 2 GND, 3 HOT, 4 GND

## CX3225CA25000D0HSSCC
designator X?, comment 25MHz
Crystal 25MHz 8pF 4-Pin CSMD T/R; Manufacturer: Kyocera AVX; Manufacturer Part Number: CX3225CA25000D0HSSCC; Item Type: Crystals; Frequency Tolerance: 20ppm; ESR (Equivalent Series Resistance): 100R; Frequency Stability: 50ppm; Supplier: Digikey; Supplier Part Number: 478-CX3225CA25000D0HSSCCCT-ND; RoHS: Yes; Stock: 27698; Pricing: 1=0.92, 10=0.795, 50=0.7164, 100=0.6852, 500=0.61818, 1000=0.59149 (USD); Mounting Technology: Surface Mount; Case/Package: SMD/SMT; Weight: 0.000564oz; Min Operating Temperature: -40°C; Max Operating Temperature: 125°C; Package Quantity: 3000; Packaging: Tape and Reel; Frequency: 25MHz; Load Capacitance: 8pF; Tolerance: 20ppm; Termination: SMD/SMT; Length: 0.126inch; Width: 0.098inch; Height: 0.035inch; Ratings: AEC-Q200; ComponentLink1URL: https://datasheet.ciiva.com/29631/cx3225ca-series-spec-29631791.pdf?src-supplier=Digikey; ComponentLink1Description: https://datasheet.ciiva.com/29631/cx3225ca-series-spec-29631791.pdf?src-supplier=Digikey
footprint SMD3225-4P
pins: 1 HOT, 2 NC, 3 HOT, 4 NC

## DT-26 32.768KHz
designator X?, comment 32.768KHz
DT-26 Crystals ROHS; Manufacturer: KDS Daishinku; Manufacturer Part Number: DT-26 32.768KHz; Package: DT-26; LCSC Part Number: C93229; Item Type: Crystal; ComponentLink1Description: LCSC; ComponentLink1URL: https://www.lcsc.com/product-detail/Crystals_KDS-Daishinku-DT-26-32-768KHz_C93229.html
footprint DT-26
pins: 1 OSC1, 2 OSC2

## DXTF321532768C10F
designator X?, comment 32.768kHz
32.768kHz 7pF ±10ppm SMD3215-2P Crystals ROHS; Manufacturer: Shenzhen; Manufacturer Part Number: DXTF321532768C10F; Package: SMD3215-2P; LCSC Part Number: C5830643; Item Type: Crystal; ComponentLink1Description: LCSC; ComponentLink1URL: https://www.lcsc.com/product-detail/Crystals_Shenzhen-SCTF-Elec-DXTF321532768C10F_C5830643.html
footprint SMD3215-2P
pins: 1 OSC1, 2 OSC2

## E3SB24E000009E
designator X?
24MHz 8pF ±10ppm SMD3225-4P Crystals ROHS; Manufacturer: Hosonic Elec; Manufacturer Part Number: E3SB24E000009E; Package: SMD3225-4P; LCSC Part Number: C5241161; Item Type: Crystal; ComponentLink1Description: LCSC; ComponentLink1URL: https://www.lcsc.com/product-detail/Crystals_Hosonic-Elec-E3SB24E000009E_C5241161.html
footprint SMD3225-4P
pins: 1 OSC1, 2 GND, 3 OSC2, 4 GND

## ECS-40-20-18-TR
designator X?
CRYSTAL 4.0000MHZ 20PF SMD; Manufacturer: ECS International; Manufacturer Part Number: ECS-40-20-18-TR; Item Type: Crystals; Supplier: Digikey; Supplier Part Number: XC587CT-ND; RoHS: Yes; Stock: 10131; Pricing: 1=2.5, 10=2.439, 50=2.323, 100=2.0326, 500=1.97456 (USD)
footprint ECS-40-20-18-TR
pins: 1 OSC1, 2 OSC2

## ECS-80-12-33-JGN-TR
designator X?, comment 8.0000MHZ
CRYSTAL 8.0000MHZ 12PF SMD; Manufacturer: ECS International; Manufacturer Part Number: ECS-80-12-33-JGN-TR; Supplier: Avnet; Supplier Part Number: ECS-80-12-33-JGN-TR; RoHS: No; Stock: 58000; Pricing: 1000=0.27283 (USD); RoHS Compliant: Yes; ComponentLink1URL: https://datasheet.octopart.com/ECS-80-12-33-JGN-TR-ECS-International-datasheet-140089731.pdf?src-supplier=Future+Electronics; ComponentLink1Description: https://datasheet.octopart.com/ECS-80-12-33-JGN-TR-ECS-International-datasheet-140089731.pdf?src-supplier=Future+Electronics; ComponentLink2URL: https://datasheet.octopart.com/ECS-80-12-33-JGN-TR-ECS-International-datasheet-17018741.pdf?src-supplier=Master+Electronics; ComponentLink2Description: https://datasheet.octopart.com/ECS-80-12-33-JGN-TR-ECS-International-datasheet-17018741.pdf?src-supplier=Master+Electronics; Item Type: Crystal
footprint SMD3225-4P
pins: 1 IN/OUT, 2 GND, 3 Out/In, 4 GND

## ECS-100-20-5PVX
designator X?, comment 10 MHz
CRYSTAL 10.0000MHZ 20PF SMD; Manufacturer: ECS International; Manufacturer Part Number: ECS-100-20-5PVX; Item Type: Crystals; Frequency: 10MHz; ESR (Equivalent Series Resistance): 60R; Frequency Stability: 50ppm; Frequency Tolerance: 30ppm; Supplier: Digikey; LCSC Part Number: C2450864; RoHS: Yes; Stock: 9071; Pricing: 1=1.63, 10=1.408, 50=1.2702, 100=1.2152, 500=1.0969 (USD); Mounting Technology: Surface Mount; Min Operating Temperature: -10°C; Max Operating Temperature: 70°C; Package Quantity: 1; Load Capacitance: 20pF; Packaging: Tape and Reel; Length: 0.449inch; Width: 0.185inch; Height: 0.102inch; ComponentLink1URL: https://datasheet.ciiva.com/858/csm-7ss-858969.pdf?src-supplier=Digikey; ComponentLink1Description: https://datasheet.ciiva.com/858/csm-7ss-858969.pdf?src-supplier=Digikey; ComponentLink2URL: https://datasheet.ciiva.com/858/csm-7ss-858970.pdf?src-supplier=Digikey; ComponentLink2Description: https://datasheet.ciiva.com/858/csm-7ss-858970.pdf?src-supplier=Digikey; ComponentLink3URL: https://datasheet.ciiva.com/858/csm-7ss-858971.pdf?src-supplier=Digikey; ComponentLink3Description: https://datasheet.ciiva.com/858/csm-7ss-858971.pdf?src-supplier=Digikey
footprint HC-49S-SMD
pins: 1 OSC1, 2 OSC2

## ECS-240-8-36-RWN-TR3
designator X?
CRYSTAL 24.0000MHZ 8PF SMD; Manufacturer: ECS Inc.; Manufacturer Part Number: ECS-240-8-36-RWN-TR3; Package: None; Item Type: Crystal
footprint SMD2520-4P
pins: 1 IN/OUT, 2 GND, 3 Out/In, 4 GND

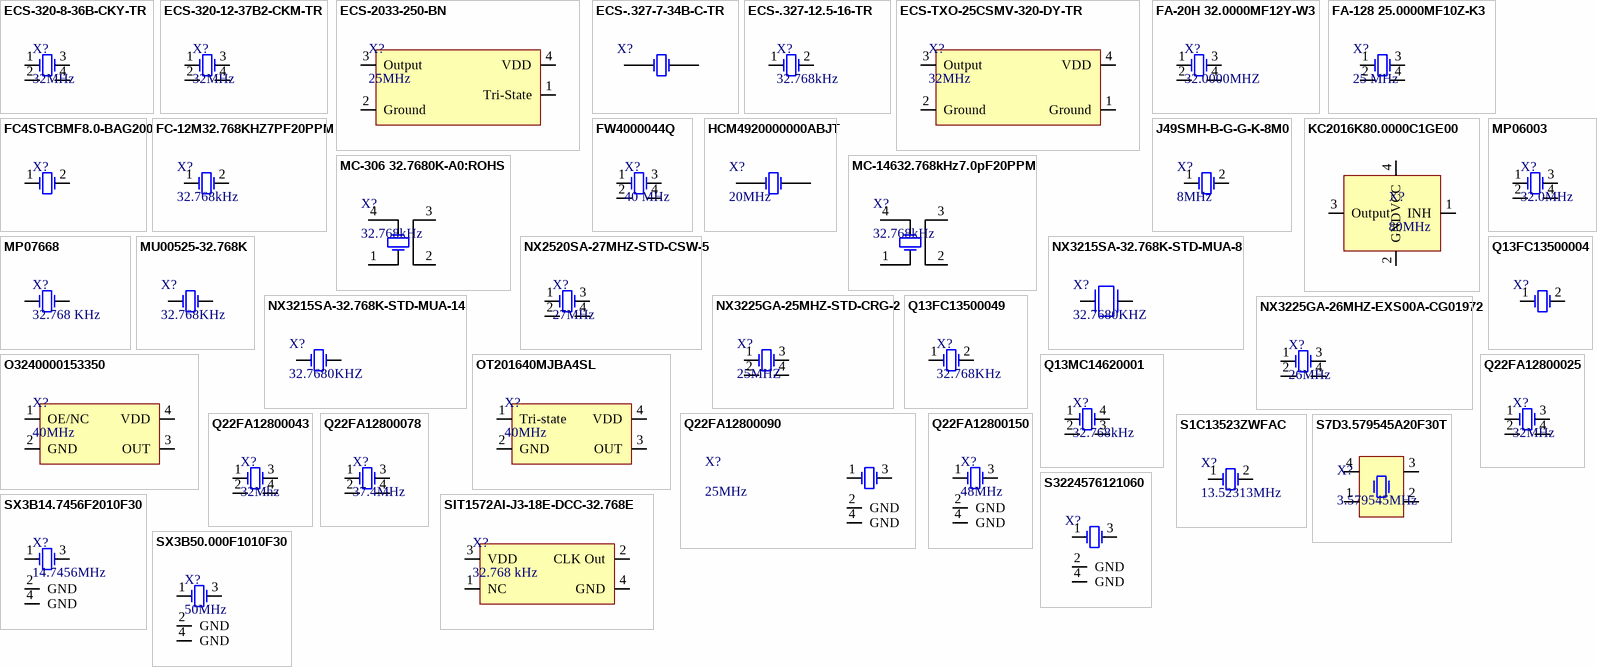
[diagram p1: symbols ECS-320-8-36B-CKY-TR to SX3B50.000F1010F30]

## ECS-320-8-36B-CKY-TR
designator X?, comment 32MHz
CRYSTAL 32.0000MHZ 8PF SMD; Manufacturer: ECS International; Manufacturer Part Number: ECS-320-8-36B-CKY-TR; Supplier: Digikey; LCSC Part Number: C7183282; RoHS: Yes; Item Type: Crystal; Stock: 66698; Pricing: 1=0.35, 10=0.301, 50=0.2636, 100=0.2461, 500=0.2369 (USD); ComponentLink1URL: https://ecsxtal.com/store/pdf/ECX-2236B.pdf?src-supplier=Digikey; ComponentLink1Description: https://ecsxtal.com/store/pdf/ECX-2236B.pdf?src-supplier=Digikey
footprint SMD2520-4P
pins: 1 IN/OUT, 2 GND, 3 Out/In, 4 GND

## ECS-320-12-37B2-CKM-TR
designator X?, comment 32MHz
CRYSTAL 32 MHZ 12PF SMD; Manufacturer: ECS International; Manufacturer Part Number: ECS-320-12-37B2-CKM-TR; Supplier: Digikey; Supplier Part Number: 50-ECS-320-12-37B2-CKM-TRCT-ND; RoHS: No; Item Type: Crystal; Pricing: 1=0.38, 10=0.327, 50=0.2962, 100=0.2839, 500=0.25738, 1000=0.24673 (USD)
footprint SMD2016-4P
pins: 1 IN/OUT, 2 GND, 3 Out/In, 4 GND

## ECS-2033-250-BN
designator X?, comment 25MHz
XTAL OSC XO 25.0000MHZ CMOS SMD; Manufacturer: ECS International; Manufacturer Part Number: ECS-2033-250-BN; Item Type: Oscillators; Supplier: Digikey; LCSC Part Number: C2441279; RoHS: Yes; Stock: 33494; Pricing: 1=2.82, 10=2.757, 50=2.626, 100=2.2978, 500=2.2321 (USD); ComponentLink1URL: https://datasheet.ciiva.com/865/ecs-2025-2033-865424.pdf?src-supplier=Digikey; ComponentLink1Description: https://datasheet.ciiva.com/865/ecs-2025-2033-865424.pdf?src-supplier=Digikey; ComponentLink2URL: https://datasheet.ciiva.com/865/ecs-2025-2033-865425.pdf?src-supplier=Digikey; ComponentLink2Description: https://datasheet.ciiva.com/865/ecs-2025-2033-865425.pdf?src-supplier=Digikey; ComponentLink3URL: https://datasheet.ciiva.com/865/ecs-2025-2033-865426.pdf?src-supplier=Digikey; ComponentLink3Description: https://datasheet.ciiva.com/865/ecs-2025-2033-865426.pdf?src-supplier=Digikey
footprint SMD2520-4P
pins: 1 Tri-State, 2 Ground, 3 Output, 4 VDD

## ECS-.327-7-34B-C-TR
designator X?
Crystals 32.768KHz 7pF; Manufacturer: ECS International; Manufacturer Part Number: ECS-.327-7-34B-C-TR; ESR (Equivalent Series Resistance): 70kR; Frequency Tolerance: 10ppm; Supplier 1: Digi-Key; Stock 1: 27045; Pricing 1: 1=0.8, 10=0.708, 50=0.6622, 100=0.5852, 500=0.5544, 1000=0.462 (USD); Mount: Surface Mount; Case/Package: SMD/SMT; Number of Pins: 2; Min Operating Temperature: -40°C; Max Operating Temperature: 85°C; Frequency: 32.768kHz; Load Capacitance: 7pF; Package Quantity: 3000; Packaging: Tape and Reel; Termination: SMD/SMT; Frequency Stability: 10ppm; Length: 0.126inch; Height: 0.035inch; Width: 0.061inch; Lead Pitch: 2.4mm; ComponentLink1URL: https://datasheet.ciiva.com/12387/ecx-31b-15952-12387920.pdf; ComponentLink1Description: https://datasheet.ciiva.com/12387/ecx-31b-15952-12387920.pdf; ComponentLink2URL: https://datasheet.ciiva.com/15047/ecx-31b-15047071.pdf; ComponentLink2Description: https://datasheet.ciiva.com/15047/ecx-31b-15047071.pdf; Supplier Part Number 1: XC1948CT-ND; LCSC Part Number: C2450085
footprint ECS-.327-7-34B-C-TR (CRYSTAL 32.7680KHZ 12.5PF SMD)
pins: 1 OSC1, 2 OSC2

## ECS-.327-12.5-16-TR
designator X?, comment 32.768kHz
CRYSTAL 32.7680KHZ 12.5PF SMD; Manufacturer: ECS International; Manufacturer Part Number: ECS-.327-12.5-16-TR; Supplier: Avnet; Supplier Part Number: ECS-.327-12.5-16-TR; RoHS: Yes; Category: Crystals; Stock: 20000; Pricing: 5000=0.403 (USD); ComponentLink1URL: https://datasheet.octopart.com/ECS-.327-12.5-16-TR-ECS-International-datasheet-14433430.pdf?src-supplier=Future+Electronics; ComponentLink1Description: https://datasheet.octopart.com/ECS-.327-12.5-16-TR-ECS-International-datasheet-14433430.pdf?src-supplier=Future+Electronics; ComponentLink2URL: http://www.ecsxtal.com/store/pdf/ECX-16.pdf?src-supplier=Digikey; ComponentLink2Description: http://www.ecsxtal.com/store/pdf/ECX-16.pdf?src-supplier=Digikey; ComponentLink3URL: http://www.ecsxtal.com/store/pdf/partnumber4.pdf?src-supplier=Digikey; ComponentLink3Description: http://www.ecsxtal.com/store/pdf/partnumber4.pdf?src-supplier=Digikey; ComponentLink4URL: https://datasheet.octopart.com/ECS-.327-12.5-16-TR-ECS-International-datasheet-130008819.pdf?src-supplier=Master+Electronics; ComponentLink4Description: https://datasheet.octopart.com/ECS-.327-12.5-16-TR-ECS-International-datasheet-130008819.pdf?src-supplier=Master+Electronics; Item Type: Crystal
footprint SMD1610-2P
pins: 1 OSC1, 2 OSC2

## ECS-TXO-25CSMV-320-DY-TR
designator X?, comment 32MHz
XTAL OSC TCXO 32.0000MHZ CLPSNW; Manufacturer: ECS International; Manufacturer Part Number: ECS-TXO-25CSMV-320-DY-TR; Item Type: Oscillators; Supplier: Digikey; LCSC Part Number: C2594515; RoHS: Yes; Stock: 17100; Pricing: 1=2, 10=1.739, 50=1.5762, 100=1.5109, 500=1.46514 (USD)
footprint SMD2520-4P
pins: 1 Ground, 2 Ground, 3 Output, 4 VDD

## FA-20H 32.0000MF12Y-W3
designator X?, comment 32.0000MHZ
CRYSTAL 32.0000MHZ 12PF SMD; Manufacturer: Epson; Manufacturer Part Number: FA-20H 32.0000MF12Y-W3; Item Type: Crystals; Supplier: Digikey; Supplier Part Number: SER4044CT-ND; RoHS: Yes; Stock: 8621; Pricing: 1=1.38, 10=1.191, 50=1.0742, 100=1.0275 (USD); ComponentLink1URL: https://support.epson.biz/td/api/doc_check.php?dl=brief_FA-20H&amp;lang=en&src-supplier=Digikey; ComponentLink1Description: https://support.epson.biz/td/api/doc_check.php?dl=brief_FA-20H&amp;lang=en&src-supplier=Digikey; ComponentLink2URL: https://www5.epsondevice.com/en/information/support/pdf/june_2018_psc_masterbook.pdf?src-supplier=Digikey; ComponentLink2Description: https://www5.epsondevice.com/en/information/support/pdf/june_2018_psc_masterbook.pdf?src-supplier=Digikey; ComponentLink3URL: https://support.epson.biz/td/api/doc_check.php?dl=brief_FA-20H_en.pdf&src-supplier=Digikey; ComponentLink3Description: https://support.epson.biz/td/api/doc_check.php?dl=brief_FA-20H_en.pdf&src-supplier=Digikey
footprint FA-20H 32.0000MF12Y-W3
pins: 1 IN/OUT, 2 GND, 3 Out/In, 4 GND

## FA-128 25.0000MF10Z-K3
designator X?, comment 25 MHz
CRYSTAL 25.0000MHZ 10PF SMD; Manufacturer: Epson; Manufacturer Part Number: FA-128 25.0000MF10Z-K3; Item Type: Crystals; ESR (Equivalent Series Resistance): 80Ω; Frequency: 25MHz; Frequency Stability: 10ppm; Frequency Tolerance: 0.001%; Supplier: Mouser; Supplier Part Number: 732-FA-12825MF10Z-K3; RoHS: Compliant; Stock: 234; Pricing: 1=1.1, 10=0.94, 50=0.847, 100=0.811, 1000=0.699, 10000=0.656 (USD); Case/Package: SMD/SMT; China RoHS: Compliant; Height: 508µm; Length: 2.0066mm; Lifecycle Status: Production; Load Capacitance: 10pF; Max Operating Temperature: 75°C; Min Operating Temperature: -20°C; Mounting Technology: Surface Mount; REACH SVHC: Yes; ESR: 80Ω; Width: 1.6002mm; ComponentLink1URL: https://datasheet.octopart.com:443/FA-128-25.0000MF10Z-K3-Epson-datasheet-61206169.pdf?src-supplier=Electro+Sonic; ComponentLink1Description: https://datasheet.octopart.com:443/FA-128-25.0000MF10Z-K3-Epson-datasheet-61206169.pdf?src-supplier=Electro+Sonic; ComponentLink2URL: https://datasheet.octopart.com:443/FA-12825.0000MF10Z-K3-Epson-datasheet-189100292.pdf?src-supplier=Electro+Sonic; ComponentLink2Description: https://datasheet.octopart.com:443/FA-12825.0000MF10Z-K3-Epson-datasheet-189100292.pdf?src-supplier=Electro+Sonic; ComponentLink3URL: https://datasheet.octopart.com:443/FA-12825.0000MF10Z-K3-Epson-datasheet-21378549.pdf?src-supplier=IHS; ComponentLink3Description: https://datasheet.octopart.com:443/FA-12825.0000MF10Z-K3-Epson-datasheet-21378549.pdf?src-supplier=IHS; ComponentLink4URL: http://sigma.octopart.com:80/149134826/rohs_statement/Epson-FA-128-25.0000MF10Z-K3.pdf?src-supplier=Compliance+Statements; ComponentLink4Description: http://sigma.octopart.com:80/149134826/rohs_statement/Epson-FA-128-25.0000MF10Z-K3.pdf?src-supplier=Compliance+Statements; ComponentLink5URL: http://sigma.octopart.com:80/149134825/reach_statement/Epson-FA-128-25.0000MF10Z-K3.pdf?src-supplier=Compliance+Statements; ComponentLink5Description: http://sigma.octopart.com:80/149134825/reach_statement/Epson-FA-128-25.0000MF10Z-K3.pdf?src-supplier=Compliance+Statements
footprint SMD2016-4P
pins: 1 IN/OUT, 2 GND, 3 Out/In, 4 GND

## FC4STCBMF8.0-BAG200
designator X?
CRYSTAL 8.0000MHZ 20PF TH; Manufacturer: Fox Electronics; Manufacturer Part Number: FC4STCBMF8.0-BAG200; Item Type: Crytal; Supplier: Avnet; Supplier Part Number: FC4STCBMF8.0; Pricing: 1000=0.1562, 1400=0.15386, 2400=0.14157, 5000=0.13875, 10000=0.12103 (USD); ComponentLink1URL: http://datasheet.octopart.com/FC4STCBMF8.0-BAG200-Fox-Electronics-datasheet-137006218.pdf?src-supplier=Rs; ComponentLink1Description: http://datasheet.octopart.com/FC4STCBMF8.0-BAG200-Fox-Electronics-datasheet-137006218.pdf?src-supplier=Rs; ComponentLink2URL: https://www.foxonline.com/pdfs/C4ST.pdf?src-supplier=Digikey; ComponentLink2Description: https://www.foxonline.com/pdfs/C4ST.pdf?src-supplier=Digikey
footprint HC-49S-2P
pins: 1 OSC1, 2 OSC2

## FC-12M32.768KHZ7PF20PPM
designator X?, comment 32.768kHz
CRYSTAL 32.7680KHZ 9PF SMD; Manufacturer: Seiko Epson; Manufacturer Part Number: FC-12M32.768KHZ7PF20PPM; ComponentLink1Description: LCSC; ComponentLink1URL: https://www.lcsc.com/product-detail/Crystals_Seiko-Epson-FC-12M32-768KHZ7PF20PPM_C99009.html; Package: SMD2012-2P; LCSC Part Number: C99009; Item Type: Crystal
footprint SMD2012-2P
pins: 1 OSC1, 2 OSC2

## FW4000044Q
designator X?, comment 40 MHz
Crystal 40.0000MHZ 8PF SMD; Manufacturer: Diodes; Manufacturer Part Number: FW4000044Q; Item Type: Crystals; ESR (Equivalent Series Resistance): 50R; Frequency: 40MHz; Tolerance: 0.001%; Supplier: Digikey; Supplier Part Number: FW4000044QDICT-ND; RoHS: No; Stock: 15600; Pricing: 1=0.76, 10=0.669, 50=0.6254, 100=0.5527, 500=0.52358, 1000=0.43632 (USD); Min Operating Temperature: -40°C; Max Operating Temperature: 125°C; Load Capacitance: 8pF; Height: 550um; ComponentLink1URL: https://www.diodes.com/assets/Datasheets/FW.pdf?src-supplier=Digikey; ComponentLink1Description: https://www.diodes.com/assets/Datasheets/FW.pdf?src-supplier=Digikey
footprint SMD2016-4P
pins: 1 IN/OUT, 2 GND, 3 Out/In, 4 GND

## HCM4920000000ABJT
designator X?, comment 20MHz
CRYSTAL 20.0000MHZ 18PF SMD; Manufacturer: CITIZEN; Manufacturer Part Number: HCM4920000000ABJT; Crystal Type: Passive SMD Crystal; Frequency Tolerance: 30ppm; ESR (Equivalent Series Resistance): 50R; Package: HCM-49SMD; Supplier 1: Digi-Key; RoHS: Yes; Category: Crystals; Stock 1: 172067; Pricing 1: 1=0.60000, 10=0.50000, 50=0.45000, 100=0.40000, 500=0.38000 (USD); Mount: Surface Mount; Min Operating Temperature: -40°C; Max Operating Temperature: 85°C; Load Capacitance: 18pF; Frequency: 20MHz; Lead Free: Lead Free; RoHS Compliant: Yes; ComponentLink1URL: https://datasheet.ciiva.com/16207/hcm49-16207144.pdf?src-supplier=Future+Electronics; ComponentLink1Description: https://datasheet.ciiva.com/16207/hcm49-16207144.pdf?src-supplier=Future+Electronics; Supplier Part Number 1: 300-6142-1-ND; LCSC Part Number: C326545
footprint HCM4920000000ABJT (CRYSTAL 20.0000MHZ 18PF SMD)
pins: 1 OSC1, 2 OSC2

## J49SMH-B-G-G-K-8M0
designator X?, comment 8MHz
Crystal 8.0MHZ 16PF SMD; Manufacturer: Jauch; Manufacturer Part Number: J49SMH-B-G-G-K-8M0; Supplier: Digikey; Supplier Part Number: 1908-J49SMH-B-G-G-K-8M0CT-ND; RoHS: No; Category: Uncategorized; Stock: 4777; Pricing: 1=0.22, 10=0.184, 50=0.1658, 100=0.1475, 500=0.14008 (USD); Item Type: Crystal; Package: Custom
footprint J49SMH-B-G-G-K-8M0
pins: 1 OSC1, 2 OSC2

## KC2016K80.0000C1GE00
designator X?, comment 80MHz
XTAL OSC XO 80.0000MHZ CMOS SMD; Manufacturer: Kyocera AVX; Manufacturer Part Number: KC2016K80.0000C1GE00; Max Supply Current: 8mA; Frequency Stability: 50ppm; Item Type: Crystal; Supplier 1: Digi-Key; RoHS: Yes; Category: Oscillators; Stock 1: 350; Pricing 1: 1=1.31000, 10=1.25300, 50=1.22440, 100=1.04940, 500=1.02024, 1000=0.85992 (USD); Mount: Surface Mount; Case/Package: SMD/SMT; Min Operating Temperature: -40°C; Max Operating Temperature: 85°C; Packaging: Tape and Reel; Frequency: 80MHz; Length: 0.079inch; Width: 0.063inch; Height: 0.031inch; Lead Free: Lead Free; RoHS Compliant: No; ComponentLink1URL: http://www.mouser.com/ds/2/40/clock_k_e-522534.pdf?src-supplier=Mouser; ComponentLink1Description: http://www.mouser.com/ds/2/40/clock_k_e-522534.pdf?src-supplier=Mouser; ComponentLink2URL: http://www.kyocera-crystal.jp/eng/wp-content/uploads/2014/09/pkg_e.pdf?src-supplier=Digi-Key; ComponentLink2Description: http://www.kyocera-crystal.jp/eng/wp-content/uploads/2014/09/pkg_e.pdf?src-supplier=Digi-Key; ComponentLink3URL: http://global.kyocera.com/prdct/electro/product/pdf/clock_k_e.pdf?src-supplier=Digi-Key; ComponentLink3Description: http://global.kyocera.com/prdct/electro/product/pdf/clock_k_e.pdf?src-supplier=Digi-Key; Supplier Part Number 1: 478-KC2016K80.0000C1GE00CT-ND; LCSC Part Number: C1988243
footprint KC2016K
pins: 1 INH, 2 GND, 3 Output, 4 VCC

## MC-306 32.7680K-A0:ROHS
designator X?, comment 32.768kHz
32.768kHz 12.5pF ±20ppm MC-306 Crystals ROHS; Manufacturer: Seiko Epson; Manufacturer Part Number: MC-306 32.7680K-A0:ROHS; Value: 32.786kHz; Item Type: Crystal; LCSC Part Number: C2650464; ComponentLink1Description: LCSC; ComponentLink1URL: https://www.lcsc.com/product-detail/Crystals_Seiko-Epson-MC-306-32-7680K-A0-ROHS_C2650464.html
footprint MC-306
pins: 1 OSC1, 2, 3, 4 OSC2

## MC-14632.768kHz7.0pF20PPM
designator X?, comment 32.768kHz
32.768kHz SMD Crystal Resonator 7pF 65kΩ ±20ppm -40℃~+85℃ MC-146 Crystals ROHS; Manufacturer: Seiko Epson; Manufacturer Part Number: MC-14632.768kHz7.0pF20PPM; Footprint: MC-146; ComponentLink1Description: LCSC; ComponentLink1URL: https://www.lcsc.com/product-detail/Crystals_Seiko-Epson-MC-14632-768kHz7-0pF20PPM_C94977.html; LCSC Part Number: C94977
footprint MC-146_
pins: 1 OSC1, 2, 3, 4 OSC2

## MP06003
designator X?, comment 32.0MHz
32.0MHz GSX-223/1P3MF SM Crystal; Manufacturer: Golledge; Manufacturer Part Number: MP06003; Item Type: Crystals; ESR (Equivalent Series Resistance): 50R; Frequency: 32MHz; Frequency Stability: 15ppm; Load Capacitance: 8pF; Tolerance: 0.001%; Supplier: Digikey; Supplier Part Number: 5254-MP06003CT-ND; RoHS: No; Stock: 39472; Pricing: 1=0.35, 10=0.305, 50=0.2744, 100=0.2624, 500=0.23662, 1000=0.22633 (USD); Pins: 4NUMBER
footprint SMD2016-4P
pins: 1 IN/OUT, 2 GND, 3 Out/In, 4 GND

## MP07668
designator X?, comment 32.768 KHz
32.7680 kHz GWX-2012 Crystal; Manufacturer: Golledge; Manufacturer Part Number: MP07668; Item Type: Crystals; Supplier: Digikey; Supplier Part Number: 5254-MP07668CT-ND; RoHS: No; Stock: 3456; Pricing: 1=0.42, 10=0.362, 50=0.3264, 100=0.3122, 500=0.28148, 1000=0.26926 (USD)
footprint 2-SMD, (2.00mm x 1.20mm)
pins: 1 OSC1, 2 OSC2

## MU00525-32.768K
designator X?, comment 32.768KHz
CRYSTAL 32.7680KHZ 6PF SMD; Manufacturer: NDK; Manufacturer Part Number: MU00525-32.768K; Supplier: Digikey; Supplier Part Number: 644-MU00525-32.768KCT-ND; RoHS: No; Stock: 133793; Pricing: 1=0.72, 10=0.601, 50=0.5408, 100=0.4808, 500=0.45672, 1000=0.38461 (USD); Item Type: Crystal; Package: Custom; LCSC Part Number: -; ComponentLink1Description: Digikey; ComponentLink1URL: https://www.digikey.com/en/products/detail/ndk-america-inc/MU00525-32-768K/9172042?s=N4IgTCBcDaIHIA0DMYCMBWAygQQLQoDoB2ANgA4BpACQC1cBRBTABmbwFkBVV9MdEALoBfIA
footprint MU00525-32.768K
pins: 1 OSC1, 2 OSC2

## NX2520SA-27MHZ-STD-CSW-5
designator X?, comment 27MHz
SMD2520-4P Crystals ROHS; Manufacturer: NDK; Manufacturer Part Number: NX2520SA-27MHZ-STD-CSW-5; Frequency: 32.768kHz; Frequency Tolerance: 20ppm; Load Capacitance: 6pF; ESR (Equivalent Series Resistance): 70kR; Supplier 1: Rs; RoHS: Yes; Category: Crystals; Stock 1: 500; Pricing 1: 5=0.15520, 50=0.68600, 100=0.66600, 250=0.65000, 500=0.63400 (GBP); Mounting Technology: Surface Mount; Case/Package: SMD/SMT; Min Operating Temperature: -40°C; Max Operating Temperature: 85°C; Packaging: Cut Tape; Series: NX3215SA; RoHS Compliant: Yes; Supplier Part Number 1: 1847854; LCSC Part Number: C910047; Item Type: Crystal
footprint SMD2520-4P
pins: 1 OSC1, 2 GND, 3 OSC2, 4 GND